# Altium footprint library PrzejścieTHT.PcbLib: 1 footprints
Each footprint in its own frame and in the unit in brackets; x right, y up, seen from the top. Pads: shape width x height; smd on the part's side, far side on the other; paste and mask are expansions set on the pad; w line width, h text height; cw(c..) or ccw(c..) is an arc to the next point about the centre after c.
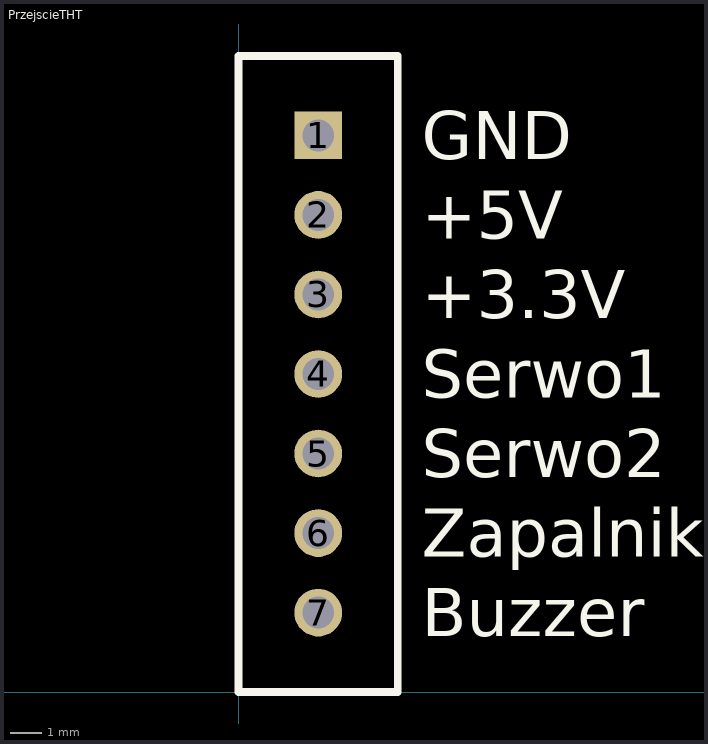
[diagram p0: the footprint, top view; thin cyan lines are the x and y axes]

## PrzejscieTHT [mil]
pads (7):
  rect 60x60 hole 40: 1(100,700)
  round 60 hole 40: 2(100,600) 3(100,500) 4(100,400) 5(100,300) 6(100,200) 7(100,100)
Top Overlay:
  lines w10: 0,0 0,800 200,800 200,0 0,0
  text "Buzzer" at 230,70 h60
  text "Zapalnik" at 230,169.99 h60
  text "Serwo2" at 230,270 h60
  text "Serwo1" at 230,370 h60
  text "+3.3V" at 230,470 h60
  text "+5V" at 230,570 h60
  text "GND" at 230,670 h60